# Altium footprint library audio$.PcbLib: 28 footprints (part 1 of 2)
Each footprint in its own frame and in the unit in brackets; x right, y up, seen from the top. Pads: shape width x height; smd on the part's side, far side on the other; paste and mask are expansions set on the pad; w line width, h text height; cw(c..) or ccw(c..) is an arc to the next point about the centre after c.
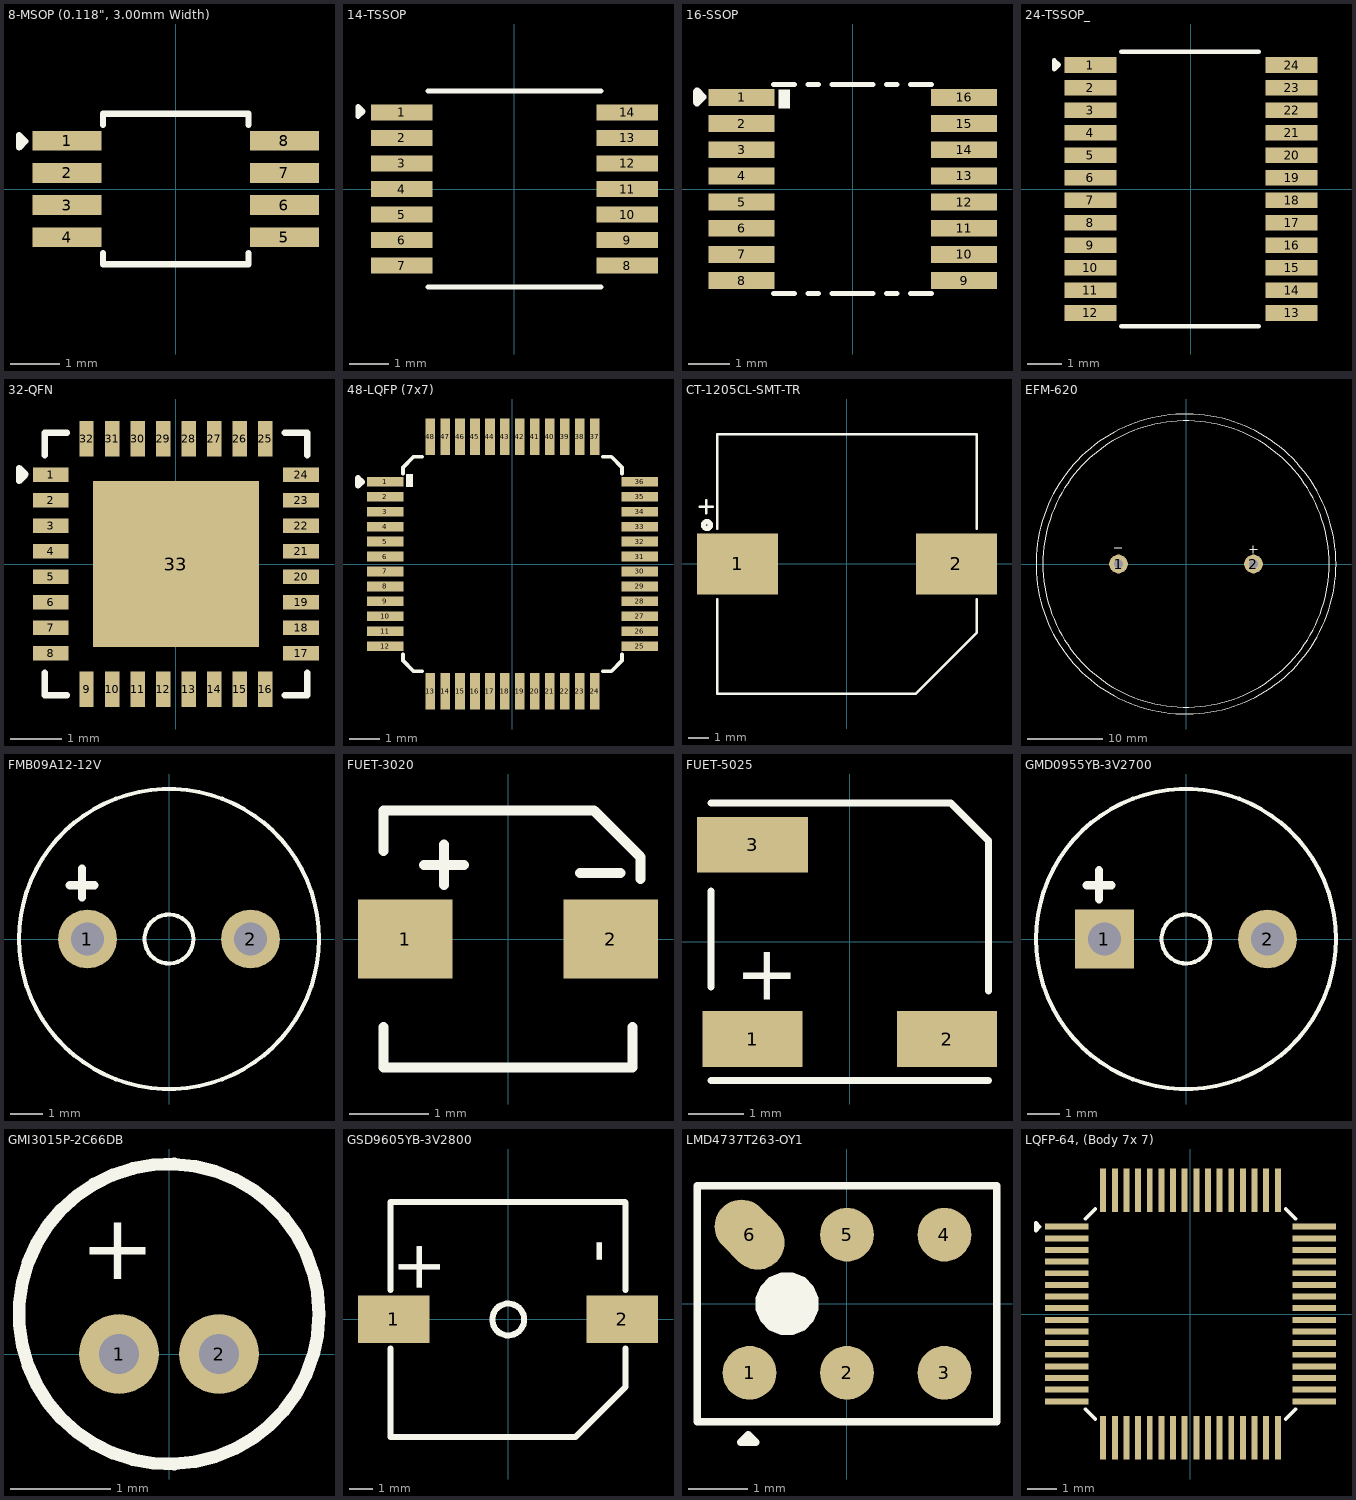
[diagram p0: the footprints below, top view; thin cyan lines are the x and y axes]

## 8-MSOP (0.118", 3.00mm Width) [mm]
pads (8):
  rect 1.4x0.4 smd: 1(-2.2,0.975) 2(-2.2,0.325) 3(-2.2,-0.325) 4(-2.2,-0.975) 5(2.2,-0.975) 6(2.2,-0.325) 7(2.2,0.325) 8(2.2,0.975)
Top Overlay:
  lines w0.127: -1.473,-1.295 -1.473,-1.524 1.473,-1.524 1.473,-1.295 ; -1.473,1.295 -1.473,1.524 1.473,1.524 1.473,1.295 ; -3.175,0.838 -3.175,1.092 -3.048,0.965 -3.175,0.838
3D body "AD8223BRMZ-R7.STEP": height 1.1, standoff 0, extent -2.45,-1.5 2.45,1.5

## 14-TSSOP [mm]
pads (14):
  rect 1.57x0.41 smd: 1(-2.87,1.95) 2(-2.87,1.3) 3(-2.87,0.65) 4(-2.87,0) 5(-2.87,-0.65) 6(-2.87,-1.3) 7(-2.87,-1.95) 8(2.87,-1.95) 9(2.87,-1.3) 10(2.87,-0.65) 11(2.87,0) 12(2.87,0.65) 13(2.87,1.3) 14(2.87,1.95)
Top Overlay:
  lines w0.127: -2.2,-2.5 2.2,-2.5 ; -2.2,2.5 2.2,2.5 ; -3.984,1.848 -3.857,1.975 -3.984,2.102 -3.984,1.848
3D body "TXB0104PWR.step": height 1.2, standoff 0, extent -3.2,-2.5 3.2,2.5

## 16-SSOP [mm]
pads (16):
  rect 1.6x0.41 smd: 1(-2.7,2.222) 2(-2.7,1.587) 3(-2.7,0.953) 4(-2.7,0.318) 5(-2.7,-0.318) 6(-2.7,-0.953) 7(-2.7,-1.587) 8(-2.7,-2.222) 9(2.7,-2.222) 10(2.7,-1.587) 11(2.7,-0.953) 12(2.7,-0.318) 13(2.7,0.318) 14(2.7,0.953) 15(2.7,1.587) 16(2.7,2.222)
Top Overlay:
  rectangle: -1.803,1.956 -1.524,2.413
  lines w0.127: -1.922,-2.54 -1.422,-2.54 ; -1.922,2.54 -1.422,2.54 ; -1.084,-2.54 -0.834,-2.54 ; -1.084,2.54 -0.834,2.54 ; -0.508,-2.54 0.492,-2.54 ; -0.508,2.54 0.492,2.54 ; 0.818,-2.54 1.068,-2.54 ; 0.818,2.54 1.068,2.54 ; 1.406,-2.54 1.906,-2.54 ; 1.406,2.54 1.906,2.54
  lines w0.2: -3.785,2.108 -3.785,2.362 -3.658,2.235 -3.785,2.108
3D body "User Library-SSOP16.step": height 1.1, standoff 0, extent -2.997,-2.489 2.997,2.489

## 24-TSSOP_ [mm]
pads (24):
  rect 1.5x0.45 smd: 1(-2.9,3.575) 2(-2.9,2.925) 3(-2.9,2.275) 4(-2.9,1.625) 5(-2.9,0.975) 6(-2.9,0.325) 7(-2.9,-0.325) 8(-2.9,-0.975) 9(-2.9,-1.625) 10(-2.9,-2.275) 11(-2.9,-2.925) 12(-2.9,-3.575) 13(2.9,-3.575) 14(2.9,-2.925) 15(2.9,-2.275) 16(2.9,-1.625) 17(2.9,-0.975) 18(2.9,-0.325) 19(2.9,0.325) 20(2.9,0.975) 21(2.9,1.625) 22(2.9,2.275) 23(2.9,2.925) 24(2.9,3.575)
Top Overlay:
  lines w0.127: -2.007,-3.962 1.956,-3.962 ; -2.007,3.962 1.956,3.962 ; -3.937,3.454 -3.937,3.708 -3.81,3.581 -3.937,3.454
3D body "SN74LVC8T245MPWREP.STEP": height 1.2, standoff 0, extent -3.2,-3.9 3.2,3.9

## 32-QFN [mm] "32pins, 5x5mm body, 0.5mm pitch QFN package"
pads (33):
  rect 0.7x0.28 smd: 1(-2.45,1.75) 2(-2.45,1.25) 3(-2.45,0.75) 4(-2.45,0.25) 5(-2.45,-0.25) 6(-2.45,-0.75) 7(-2.45,-1.25) 8(-2.45,-1.75) 17(2.45,-1.75) 18(2.45,-1.25) 19(2.45,-0.75) 20(2.45,-0.25) 21(2.45,0.25) 22(2.45,0.75) 23(2.45,1.25) 24(2.45,1.75)
  rect 0.28x0.7 smd: 9(-1.75,-2.45) 10(-1.25,-2.45) 11(-0.75,-2.45) 12(-0.25,-2.45) 13(0.25,-2.45) 14(0.75,-2.45) 15(1.25,-2.45) 16(1.75,-2.45) 25(1.75,2.45) 26(1.25,2.45) 27(0.75,2.45) 28(0.25,2.45) 29(-0.25,2.45) 30(-0.75,2.45) 31(-1.25,2.45) 32(-1.75,2.45)
  rect 3.254x3.254 smd: 33(0,0)
Top Overlay:
  lines w0.127: -2.565,-2.134 -2.565,-2.565 -2.134,-2.565 ; -2.565,2.134 -2.565,2.565 -2.134,2.565 ; 2.134,-2.565 2.565,-2.565 2.565,-2.134 ; 2.134,2.565 2.565,2.565 2.565,2.134 ; -3.073,1.626 -2.946,1.753 -3.073,1.88 -3.073,1.626
3D body "User Library-QFN-32-5x5 - EQ.STEP": height 0.85, standoff 0, extent -2.5,-2.5 2.5,2.5

## 48-LQFP (7x7) [mm]
pads (48):
  rect 1.22x0.32 smd: 1(-4.25,2.75) 2(-4.25,2.25) 3(-4.25,1.75) 4(-4.25,1.25) 5(-4.25,0.75) 6(-4.25,0.25) 7(-4.25,-0.25) 8(-4.25,-0.75) 9(-4.25,-1.25) 10(-4.25,-1.75) 11(-4.25,-2.25) 12(-4.25,-2.75) 25(4.25,-2.75) 26(4.25,-2.25) 27(4.25,-1.75) 28(4.25,-1.25) 29(4.25,-0.75) 30(4.25,-0.25) 31(4.25,0.25) 32(4.25,0.75) 33(4.25,1.25) 34(4.25,1.75) 35(4.25,2.25) 36(4.25,2.75)
  rect 0.32x1.22 smd: 13(-2.75,-4.25) 14(-2.25,-4.25) 15(-1.75,-4.25) 16(-1.25,-4.25) 17(-0.75,-4.25) 18(-0.25,-4.25) 19(0.25,-4.25) 20(0.75,-4.25) 21(1.25,-4.25) 22(1.75,-4.25) 23(2.25,-4.25) 24(2.75,-4.25) 37(2.75,4.25) 38(2.25,4.25) 39(1.75,4.25) 40(1.25,4.25) 41(0.75,4.25) 42(0.25,4.25) 43(-0.25,4.25) 44(-0.75,4.25) 45(-1.25,4.25) 46(-1.75,4.25) 47(-2.25,4.25) 48(-2.75,4.25)
Top Overlay:
  rectangle: -3.556,2.565 -3.327,2.997
  lines w0.127: -3.658,-3.023 -3.658,-3.226 -3.302,-3.581 -3.023,-3.581 ; -3.658,3.023 -3.658,3.226 -3.302,3.581 -3.023,3.581 ; 3.023,-3.581 3.302,-3.581 3.658,-3.226 3.658,-3.023 ; 3.023,3.581 3.302,3.581 3.658,3.226 3.658,3.023
  lines w0.2: -5.156,2.616 -5.156,2.87 -5.029,2.743 -5.156,2.616
3D body "User Library-P-LQFP48-7x7-0_50.step": height 1.43, standoff -0.02, extent -4.513,-4.512 4.487,4.488

## CT-1205CL-SMT-TR [mm]
pads (2):
  rect 4x3 smd: 1(-5.4,0) 2(5.4,0)
Top Overlay:
  circle w0.254: c-6.909,1.92 r0.17
  lines w0.127: -7.252,2.819 -6.617,2.819 ; -6.934,2.502 -6.934,3.137 ; -6.4,-1.75 -6.4,-6.4 3.4,-6.4 6.4,-3.4 6.4,-1.75 ; -6.4,1.75 -6.4,6.4 6.4,6.4 6.4,1.75
3D body "CUI_DEVICES_CT-1205CL-SMT-TR.step": height 7.1, standoff 0, extent -6.9,-6.4 6.9,6.4

## EFM-620 [mm]
pads (2):
  round 2.5 hole 1.25: 1(-9,0) 2(9,0)
Top Overlay:
  circle w0.127: c0,0 r19.087
  circle w0.127: c0,0 r20
  lines w0.127: -9.542,2.159 -8.542,2.159 ; 8.5,1.956 9.5,1.956 ; 9,1.456 9,2.456
3D body "EFM-620.STEP": height 20, standoff -6, extent -20,-20 20,20

## FMB09A12-12V [mm]
pads (2):
  round 1.8 hole 1 copper offset 0,0 paste+0 mask+0.051: 1(-2.5,0)
  round 1.8 hole 1 paste+0 mask+0.051: 2(2.5,0)
Top Overlay:
  circle w0.127: c-0.001,0 r0.75
  circle w0.127: c-0.001,0 r4.6
  lines w0.254: -3.048,1.651 -2.286,1.651 ; -2.667,1.27 -2.667,2.159
3D body "Buzzer.step": height 5.51, standoff -4.5, extent -4.5,-4.5 4.5,4.5

## FUET-3020 [mm]
pads (2):
  rect 1.2x1 smd: 1(-1.3,0) 2(1.3,0)
Top Overlay:
  lines w0.127: -1.575,-1.118 -1.575,-1.626 1.575,-1.626 1.575,-1.118 ; -1.575,1.118 -1.575,1.626 1.092,1.626 1.676,1.041 1.676,0.762 ; -1.067,0.94 -0.559,0.94 ; -0.813,0.686 -0.813,1.194 ; 0.914,0.838 1.422,0.838
3D body "FUET-3020.STEP": height 2.01, standoff 0, extent -1.72,-1.61 1.72,1.6

## FUET-5025 [mm]
pads (3):
  rect 1.8x1 smd: 1(-1.75,-1.75) 2(1.75,-1.75)
  rect 2x1 smd: 3(-1.75,1.75)
Top Overlay:
  lines w0.127: -2.5,-2.5 2.5,-2.5 ; -2.5,-0.81 -2.5,0.91 ; -2.499,2.499 1.819,2.499 2.499,1.819 2.499,1.397 2.499,-0.889
  text "+" at -2.06,-1.044 h1
3D body "C391030.step": height 2.51, standoff 0, extent -2.501,-2.505 2.499,2.505

## GMD0955YB-3V2700 [mm]
pads (2):
  rect 1.8x1.8 hole 1 copper offset 0,0 paste+0 mask+0.051: 1(-2.5,0)
  round 1.8 hole 1 paste+0 mask+0.051: 2(2.5,0)
Top Overlay:
  circle w0.127: c-0.001,0 r4.6
  circle w0.127: c-0.001,0 r0.75
  lines w0.254: -3.048,1.651 -2.286,1.651 ; -2.667,1.219 -2.667,2.108
3D body "C252933.step": height 5.51, standoff -4.5, extent -4.501,-4.5 4.499,4.5

## GMI3015P-2C66DB [mm]
pads (2):
  round 0.8 hole 0.4 paste+0 mask+0.051: 1(-0.5,0) 2(0.5,0)
Top Overlay:
  circle w0.127: c0,0.4 r1.5
  text "+" at -0.889,0.747 h0.65
3D body "C529836.step": height 1.7, standoff -1.4, extent -1.5,-1.089 1.5,1.91

## GSD9605YB-3V2800 [mm]
pads (2):
  rect 3x2 smd: 1(-4.8,0) 2(4.8,0)
Top Overlay:
  circle w0.254: c0.01,-0.01 r0.669
  lines w0.254: -4.94,-1.231 -4.94,-4.95 2.83,-4.95 4.93,-2.85 4.93,-1.231 ; -4.94,1.231 -4.94,4.92 4.91,4.92 ; 4.93,1.231 4.93,4.91
  text "+" at -4.59,3.36 h2.03
  text "-" at 3.08,3.36 h2.03
3D body "C255327.step": height 4.95, standoff 0, extent -5,-4.8 5,4.81

## LMD4737T263-OY1 [mm]
pads (6):
  round 0.91 smd: 1(-1.65,-1.17) 2(0,-1.17) 3(1.65,-1.17) 4(1.65,1.17) 5(0,1.17)
  oval 0.91x1.3 smd rot 45: 6(-1.65,1.17)
Top Overlay:
  region: -1.016,-0.529 -1.121,-0.529 -1.315,-0.448 -1.464,-0.299 -1.545,-0.105 -1.545,0.105 -1.464,0.299 -1.315,0.448 -1.121,0.529 -1.016,0.529 -0.911,0.529 -0.717,0.448 -0.568,0.299 -0.487,0.105 -0.487,-0.105 -0.568,-0.299 -0.717,-0.448 -0.911,-0.529
  lines w0.127: -2.54,-2 2.54,-2 2.54,2 -2.54,2 -2.54,-2 ; -1.801,-2.347 -1.674,-2.22 -1.547,-2.347 -1.801,-2.347
3D body: height 1.25, standoff 0, extent -2.54,-2 2.54,2

## LQFP-64, (Body 7x 7) [mm]
pads (64):
  rect 1.5x0.204 smd mask+0.085: 1(-4.25,3) 2(-4.25,2.6) 3(-4.25,2.2) 4(-4.25,1.8) 5(-4.25,1.4) 6(-4.25,1) 7(-4.25,0.6) 8(-4.25,0.2) 9(-4.25,-0.2) 10(-4.25,-0.6) 11(-4.25,-1) 12(-4.25,-1.4) 13(-4.25,-1.8) 14(-4.25,-2.2) 15(-4.25,-2.6) 16(-4.25,-3) 33(4.25,-3) 34(4.25,-2.6) 35(4.25,-2.2) 36(4.25,-1.8) 37(4.25,-1.4) 38(4.25,-1) 39(4.25,-0.6) 40(4.25,-0.2) 41(4.25,0.2) 42(4.25,0.6) 43(4.25,1) 44(4.25,1.4) 45(4.25,1.8) 46(4.25,2.2) 47(4.25,2.6) 48(4.25,3)
  rect 0.204x1.5 smd mask+0.085: 17(-3,-4.25) 18(-2.6,-4.25) 19(-2.2,-4.25) 20(-1.8,-4.25) 21(-1.4,-4.25) 22(-1,-4.25) 23(-0.6,-4.25) 24(-0.2,-4.25) 25(0.2,-4.25) 26(0.6,-4.25) 27(1,-4.25) 28(1.4,-4.25) 29(1.8,-4.25) 30(2.2,-4.25) 31(2.6,-4.25) 32(3,-4.25) 49(3,4.25) 50(2.6,4.25) 51(2.2,4.25) 52(1.8,4.25) 53(1.4,4.25) 54(1,4.25) 55(0.6,4.25) 56(0.2,4.25) 57(-0.2,4.25) 58(-0.6,4.25) 59(-1,4.25) 60(-1.4,4.25) 61(-1.8,4.25) 62(-2.2,4.25) 63(-2.6,4.25) 64(-3,4.25)
Top Overlay:
  lines w0.127: -3.607,-3.277 -3.277,-3.607 ; -3.607,3.277 -3.277,3.607 ; 3.277,-3.607 3.607,-3.277 ; 3.277,3.607 3.607,3.277 ; -5.309,2.87 -5.309,3.124 -5.182,2.997 -5.309,2.87
3D body "ep9511e_lqfp-64.stp": height 1.43, standoff -0.01, extent -4.5,-4.5 4.5,4.5